# Altium integrated library PDS760-13.IntLib: 1 symbol
Pins are listed as number, name and electrical type; pins without a type are passive.

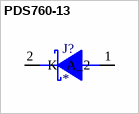
[diagram p0: symbol PDS760-13]

## PDS760-13
designator J?
Diode Schottky 60V 7A 3Pin PowerDI 5 | Diodes Inc PDS760-13; MF: Diodes Inc.; SnapEDA_Link: https://www.snapeda.com/parts/PDS760-13/Diodes+Inc./view-part/?ref=snap; Package: PowerDIâ„¢-5 Diodes Inc.; Value: *; MP: PDS760-13; Check_prices: https://www.snapeda.com/parts/PDS760-13/Diodes+Inc./view-part/?ref=eda
footprint POWERDI5
pins: 1 A_2, 2 K